# Altium footprint library 2.00-SOP、SOIC封装.PcbLib: 70 footprints (part 1 of 5)
Each footprint in its own frame and in the unit in brackets; x right, y up, seen from the top. Pads: shape width x height; smd on the part's side, far side on the other; paste and mask are expansions set on the pad; w line width, h text height; cw(c..) or ccw(c..) is an arc to the next point about the centre after c.
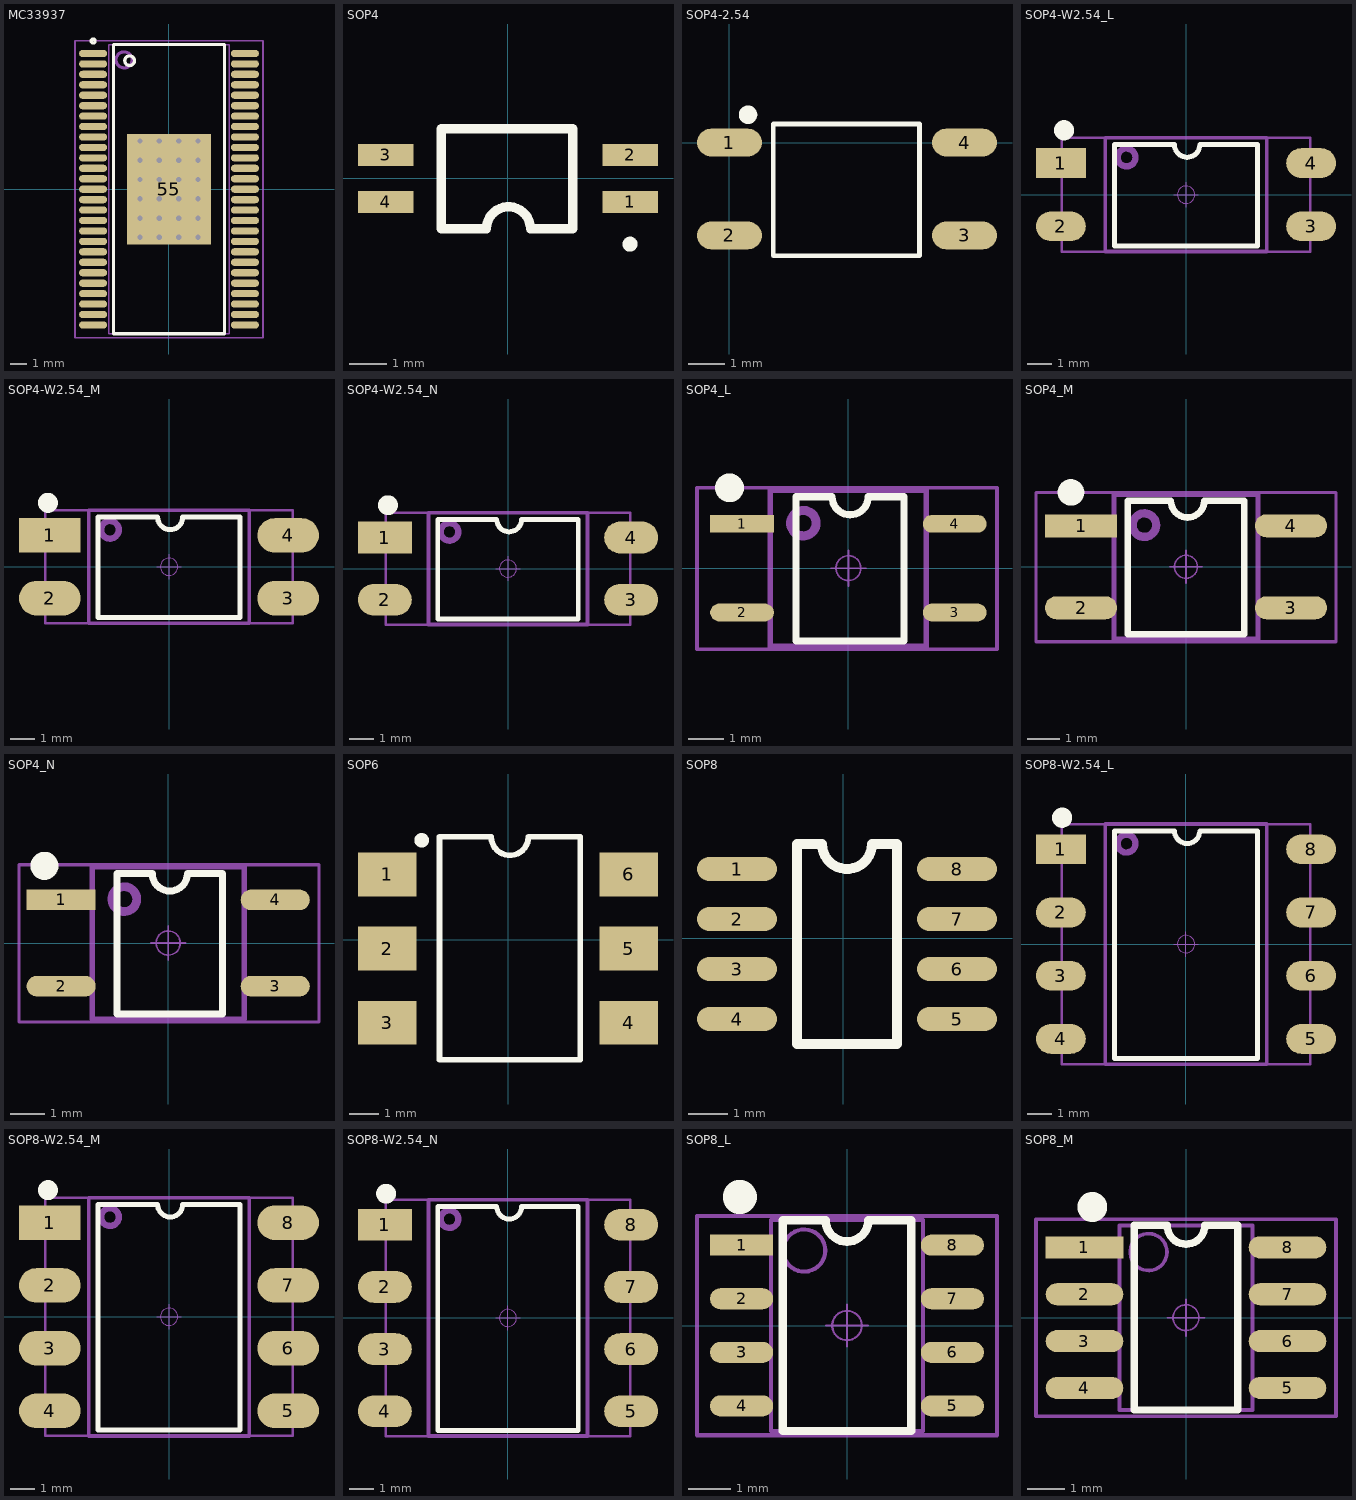
[diagram p0: the footprints below, top view; thin cyan lines are the x and y axes]

## MC33937 [mm] "SOP, 54-Leads, Body 18.0x7.5mm (max), Pitch 0.65mm, IPC Medium Density"
height 2.45
pads (55):
  oval 1.75x0.45 smd: 1(-4.725,8.45) 2(-4.725,7.8) 3(-4.725,7.15) 4(-4.725,6.5) 5(-4.725,5.85) 6(-4.725,5.2) 7(-4.725,4.55) 8(-4.725,3.9) 9(-4.725,3.25) 10(-4.725,2.6) 11(-4.725,1.95) 12(-4.725,1.3) 13(-4.725,0.65) 14(-4.725,0) 15(-4.725,-0.65) 16(-4.725,-1.3) 17(-4.725,-1.95) 18(-4.725,-2.6) 19(-4.725,-3.25) 20(-4.725,-3.9) 21(-4.725,-4.55) 22(-4.725,-5.2) 23(-4.725,-5.85) 24(-4.725,-6.5) 25(-4.725,-7.15) 26(-4.725,-7.8) 27(-4.725,-8.45) 28(4.725,-8.45) 29(4.725,-7.8) 30(4.725,-7.15) 31(4.725,-6.5) 32(4.725,-5.85) 33(4.725,-5.2) 34(4.725,-4.55) 35(4.725,-3.9) 36(4.725,-3.25) 37(4.725,-2.6) 38(4.725,-1.95) 39(4.725,-1.3) 40(4.725,-0.65) 41(4.725,0) 42(4.725,0.65) 43(4.725,1.3) 44(4.725,1.95) 45(4.725,2.6) 46(4.725,3.25) 47(4.725,3.9) 48(4.725,4.55) 49(4.725,5.2) 50(4.725,5.85) 51(4.725,6.5) 52(4.725,7.15) 53(4.725,7.8) 54(4.725,8.45)
  rect 5.2x6.9 smd: 55(0,0)
via 1.8,-3 diameter 0.66 hole 0.33
via 0.6,-3 diameter 0.66 hole 0.33
via -0.6,-3 diameter 0.66 hole 0.33
via -1.8,-3 diameter 0.66 hole 0.33
via 1.8,-1.8 diameter 0.66 hole 0.33
via 0.6,-1.8 diameter 0.66 hole 0.33
via -0.6,-1.8 diameter 0.66 hole 0.33
via -1.8,-1.8 diameter 0.66 hole 0.33
via 1.8,-0.6 diameter 0.66 hole 0.33
via 0.6,-0.6 diameter 0.66 hole 0.33
via -0.6,-0.6 diameter 0.66 hole 0.33
via -1.8,-0.6 diameter 0.66 hole 0.33
via 1.8,0.6 diameter 0.66 hole 0.33
via 0.6,0.6 diameter 0.66 hole 0.33
via -0.6,0.6 diameter 0.66 hole 0.33
via -1.8,0.6 diameter 0.66 hole 0.33
via 1.8,1.8 diameter 0.66 hole 0.33
via 0.6,1.8 diameter 0.66 hole 0.33
via -0.6,1.8 diameter 0.66 hole 0.33
via -1.8,1.8 diameter 0.66 hole 0.33
via 1.8,3 diameter 0.66 hole 0.33
via 0.6,3 diameter 0.66 hole 0.33
via -0.6,3 diameter 0.66 hole 0.33
via -1.8,3 diameter 0.66 hole 0.33
Top Overlay:
  circle w0.2: c-2.45,8 r0.3
  circle w0.2: c-4.725,9.225 r0.125
  lines w0.2: -3.45,-9 3.45,-9 3.45,9 -3.45,9 -3.45,-9
Mechanical 13:
  circle w0.2: c-2.8,8.05 r0.5
  lines w0.1: -3.75,-9 3.75,-9 3.75,9 -3.75,9 -3.75,-9
Mechanical 15:
  lines w0.1: -0.5,0 0.5,0 ; 0,-0.5 0,0.5 ; -5.85,-9.25 5.85,-9.25 5.85,9.25 -5.85,9.25 -5.85,-9.25
3D body: height 2.45, standoff 0.1, extent -3.75,-9 3.75,9

## SOP4 [mm] "间距1.27mm     封装库来自淘宝卖家 ID：黄晶宝石"
pads (4):
  rect 1.5x0.6 smd: 1(3.31,-0.635) 2(3.31,0.635) 3(-3.309,0.635) 4(-3.309,-0.635)
Top Overlay:
  circle w0.203: c3.302,-1.778 r0.102
  lines w0.254: -1.805,-1.361 -1.805,1.346 ; -1.794,-1.361 -0.582,-1.361 cw(c0.013,-1.361) 0.608,-1.361 1.751,-1.361 1.751,1.346 -1.786,1.346
3D body "SOP-4-1.STEP": height 2.1, standoff 0, extent -3.5,-1.4 3.5,1.4

## SOP4-2.54 [mil] "间距2.54mm       封装库来自淘宝卖家 ID：黄晶宝石"
pads (4):
  oval 70x30 smd: 1(0,0) 2(0,-100) 3(253.23,-100) 4(253.23,0)
Top Overlay:
  circle w10: c20,30 r4.92
  lines w5: 47.24,-121.73 204.72,-121.73 204.72,20 47.24,20 47.24,-121.73
3D body "SOP-42.STEP": height 78.74, standoff -3.96, extent -12.79,-120.87 262.8,20.87

## SOP4-W2.54_L [mm] "6.5*4.58*3.5mm（长宽高）   封装库来自淘宝卖家 ID：黄晶宝石"
pads (4):
  rect 2x1.2 smd: 1(-5.029,1.27)
  oval 2x1.2 smd: 2(-5.029,-1.27) 3(5.029,-1.27) 4(5.029,1.27)
Top Overlay:
  circle w0.5: c-4.904,2.591 r0.155
  lines w0.2: -2.87,2.012 -2.87,-2.052 2.87,-2.052 2.87,2.012
  lines w0.203: -2.87,2.012 -0.46,2.012 ccw(c0.048,2.012) 0.048,1.504 ccw(c0.048,2.012) 0.556,2.012 2.87,2.012
Mechanical 13:
  circle w0.254: c-2.391,1.499 r0.359
  lines w0.15: -3.25,-2.286 3.25,-2.286 3.25,2.286 -3.25,2.286 -3.25,-2.286
Mechanical 15:
  circle w0.05: c0,0 r0.35
  lines w0.05: -0.5,0 0.5,0 ; 0,-0.5 0,0.5
  lines w0.1: -5.004,-2.286 5.004,-2.286 5.004,2.286 -5.004,2.286 -5.004,-2.286
3D body "SOP-4 6.5.STEP": height 3.83, standoff -0.02, extent -5,-2.29 5,2.29

## SOP4-W2.54_M [mm] "6.5*4.58*3.5mm（长宽高）  淘宝ID:黄晶宝石"
pads (4):
  rect 2.5x1.4 smd: 1(-4.826,1.27)
  oval 2.5x1.4 smd: 2(-4.826,-1.27) 3(4.826,-1.27) 4(4.826,1.27)
Top Overlay:
  circle w0.5: c-4.904,2.591 r0.155
  lines w0.2: -2.87,2.012 -2.87,-2.052 2.87,-2.052 2.87,2.012
  lines w0.203: -2.87,2.012 -0.46,2.012 ccw(c0.048,2.012) 0.048,1.504 ccw(c0.048,2.012) 0.556,2.012 2.87,2.012
Mechanical 13:
  circle w0.254: c-2.391,1.499 r0.359
  lines w0.15: -3.25,-2.286 3.25,-2.286 3.25,2.286 -3.25,2.286 -3.25,-2.286
Mechanical 15:
  circle w0.05: c0,0 r0.35
  lines w0.05: -0.5,0 0.5,0 ; 0,-0.5 0,0.5
  lines w0.1: -5.004,-2.286 5.004,-2.286 5.004,2.286 -5.004,2.286 -5.004,-2.286
3D body "SOP-4 6.5.STEP": height 3.83, standoff -0.02, extent -5,-2.29 5,2.29

## SOP4-W2.54_N [mm] "6.5*4.58*3.5mm（长宽高）  淘宝ID:黄晶宝石"
pads (4):
  rect 2.2x1.3 smd: 1(-5.029,1.27)
  oval 2.2x1.3 smd: 2(-5.029,-1.27) 3(5.029,-1.27) 4(5.029,1.27)
Top Overlay:
  circle w0.5: c-4.904,2.591 r0.155
  lines w0.2: -2.87,2.012 -2.87,-2.052 2.87,-2.052 2.87,2.012
  lines w0.203: -2.87,2.012 -0.46,2.012 ccw(c0.048,2.012) 0.048,1.504 ccw(c0.048,2.012) 0.556,2.012 2.87,2.012
Mechanical 13:
  circle w0.254: c-2.391,1.499 r0.359
  lines w0.15: -3.25,-2.286 3.25,-2.286 3.25,2.286 -3.25,2.286 -3.25,-2.286
Mechanical 15:
  circle w0.05: c0,0 r0.35
  lines w0.05: -0.5,0 0.5,0 ; 0,-0.5 0,0.5
  lines w0.1: -5.004,-2.286 5.004,-2.286 5.004,2.286 -5.004,2.286 -5.004,-2.286
3D body "SOP-4 6.5.STEP": height 3.83, standoff -0.02, extent -5,-2.29 5,2.29

## SOP4_L [mm] "4.4*6.8*2.1mm（长宽高）封装库来自淘宝卖家 ID：黄晶宝石"
pads (4):
  rect 1.8x0.5 smd: 1(-3,1.25)
  oval 1.8x0.5 smd: 2(-3,-1.25) 3(3,-1.25) 4(3,1.25)
Top Overlay:
  circle w0.5: c-3.353,2.266 r0.155
  lines w0.2: -1.476,2.012 -1.476,-2.052 1.572,-2.052 1.572,2.012
  lines w0.203: -1.476,2.012 -0.46,2.012 ccw(c0.048,2.012) 0.048,1.504 ccw(c0.048,2.012) 0.556,2.012 1.572,2.012
Mechanical 13:
  circle w0.254: c-1.27,1.27 r0.359
  lines w0.15: -2.2,-2.2 -2.2,2.2 2.2,2.2 2.2,-2.2 -2.2,-2.2
Mechanical 15:
  circle w0.05: c0,0 r0.35
  lines w0.05: -0.5,0 0.5,0 ; 0,-0.5 0,0.5
  lines w0.1: -4.27,-2.286 4.191,-2.286 4.191,2.266 -4.27,2.266 -4.27,-2.286
3D body "SOP4.STEP": height 1.9, standoff 0, extent -3.403,-2.15 3.403,2.15

## SOP4_M [mm] "4.4*6.8*2.1mm（长宽高）  淘宝ID:黄晶宝石"
pads (4):
  rect 2.2x0.7 smd: 1(-3.2,1.25)
  oval 2.2x0.7 smd: 2(-3.2,-1.25) 3(3.2,-1.25) 4(3.2,1.25)
Top Overlay:
  circle w0.5: c-3.505,2.266 r0.155
  lines w0.2: -1.778,2.012 -1.778,-2.052 1.778,-2.052 1.778,2.012
  lines w0.203: -1.778,2.012 -0.46,2.012 ccw(c0.048,2.012) 0.048,1.504 ccw(c0.048,2.012) 0.556,2.012 1.778,2.012
Mechanical 13:
  circle w0.254: c-1.27,1.27 r0.359
  lines w0.15: -2.2,-2.2 2.2,-2.2 2.2,2.2 -2.2,2.2 -2.2,-2.2
Mechanical 15:
  circle w0.05: c0,0 r0.35
  lines w0.05: -0.5,0 0.5,0 ; 0,-0.5 0,0.5
  lines w0.1: -4.572,-2.286 4.572,-2.286 4.572,2.266 -4.572,2.266 -4.572,-2.286
3D body "SOP4.STEP": height 1.9, standoff 0, extent -3.403,-2.15 3.403,2.15

## SOP4_N [mm] "4.4*6.8*2.1mm（长宽高）"
pads (4):
  rect 2x0.6 smd: 1(-3.1,1.25)
  oval 2x0.6 smd: 2(-3.1,-1.25) 3(3.1,-1.25) 4(3.1,1.25)
Top Overlay:
  circle w0.5: c-3.581,2.235 r0.155
  lines w0.2: -1.476,2.012 -1.476,-2.052 1.572,-2.052 1.572,2.012
  lines w0.203: -1.476,2.012 -0.46,2.012 ccw(c0.048,2.012) 0.048,1.504 ccw(c0.048,2.012) 0.556,2.012 1.572,2.012
Mechanical 13:
  circle w0.254: c-1.27,1.27 r0.359
  lines w0.15: -2.2,-2.2 2.2,-2.2 2.2,2.2 -2.2,2.2 -2.2,-2.2
Mechanical 15:
  circle w0.05: c0,0 r0.35
  lines w0.05: -0.5,0 0.5,0 ; 0,-0.5 0,0.5
  lines w0.1: -4.318,-2.286 4.366,-2.286 4.366,2.266 -4.318,2.266 -4.318,-2.286
3D body "SOP4.STEP": height 1.9, standoff 0, extent -3.403,-2.15 3.403,2.15

## SOP6 [mm] "封装库来自淘宝卖家 ID：黄晶宝石"
pads (6):
  rect 2x1.5 smd: 1(-4.14,2.235) 2(-4.14,-0.305) 3(-4.14,-2.845) 4(4.14,-2.845) 5(4.14,-0.305) 6(4.14,2.235)
Top Overlay:
  circle w0.25: c-2.957,3.404 r0.125
  lines w0.2: -2.349,-4.115 -2.349,3.524 -0.572,3.524 ccw(c0.064,3.524) 0.699,3.524 2.476,3.524 2.476,-4.115 -2.349,-4.115
3D body "SOP-6.STEP": height 4, standoff -0.08, extent -4.572,-4.636 4.593,3.874

## SOP8 [mil] "封装库来自淘宝卖家 ID：黄晶宝石"
pads (8):
  oval 80x24 smd: 1(-106,69) 2(-106,19) 3(-106,-31) 4(-106,-81) 5(114,-81) 6(114,-31) 7(114,19) 8(114,69)
Top Overlay:
  lines w10: -46,-106 54,-106 54,94 29,94 cw(c4,94) -21,94 -46,94 -46,-106
3D body "SOP8.STEP": height 62.99, standoff 0, extent -108.93,-103.82 128.94,93.82

## SOP8-W2.54_L [mm] "6.5*9.66*3.5mm（长宽高）  淘宝ID:黄晶宝石"
pads (8):
  rect 2x1.2 smd: 1(-5.029,3.81)
  oval 2x1.2 smd: 2(-5.029,1.27) 3(-5.029,-1.27) 4(-5.029,-3.81) 5(5.029,-3.81) 6(5.029,-1.27) 7(5.029,1.27) 8(5.029,3.81)
Top Overlay:
  circle w0.5: c-4.98,5.08 r0.155
  lines w0.2: -2.87,4.552 -2.87,-4.592 2.87,-4.592 2.87,4.552
  lines w0.203: -2.87,4.552 -0.46,4.552 ccw(c0.048,4.552) 0.048,4.044 ccw(c0.048,4.552) 0.556,4.552 2.87,4.552
Mechanical 13:
  circle w0.254: c-2.391,4.039 r0.359
  lines w0.15: -3.25,-4.826 -3.25,4.826 3.25,4.826 3.25,-4.826 -3.25,-4.826
Mechanical 15:
  circle w0.05: c0,0 r0.35
  lines w0.05: -0.5,0 0.5,0 ; 0,-0.5 0,0.5
  lines w0.1: -5.004,-4.826 -5.004,4.826 5.004,4.826 5.004,-4.826 -5.004,-4.826
3D body "SOP8-W2.54.STEP": height 3.82, standoff -0.03, extent -5,-4.83 5,4.83

## SOP8-W2.54_M [mm] "6.5*9.66*3.5mm（长宽高）  淘宝ID:黄晶宝石"
pads (8):
  rect 2.5x1.4 smd: 1(-4.826,3.81)
  oval 2.5x1.4 smd: 2(-4.826,1.27) 3(-4.826,-1.27) 4(-4.826,-3.81) 5(4.826,-3.81) 6(4.826,-1.27) 7(4.826,1.27) 8(4.826,3.81)
Top Overlay:
  circle w0.5: c-4.904,5.131 r0.155
  lines w0.2: -2.87,4.552 -2.87,-4.592 2.87,-4.592 2.87,4.552
  lines w0.203: -2.87,4.552 -0.46,4.552 ccw(c0.048,4.552) 0.048,4.044 ccw(c0.048,4.552) 0.556,4.552 2.87,4.552
Mechanical 13:
  circle w0.254: c-2.391,4.039 r0.359
  lines w0.15: -3.25,-4.826 3.25,-4.826 3.25,4.826 -3.25,4.826 -3.25,-4.826
Mechanical 15:
  circle w0.05: c0,0 r0.35
  lines w0.05: -0.5,0 0.5,0 ; 0,-0.5 0,0.5
  lines w0.1: -5.004,-4.826 5.004,-4.826 5.004,4.826 -5.004,4.826 -5.004,-4.826
3D body "SOP8-W2.54.STEP": height 3.82, standoff -0.03, extent -5,-4.83 5,4.83

## SOP8-W2.54_N [mm] "6.5*9.66*3.5mm（长宽高）  淘宝ID:黄晶宝石"
pads (8):
  rect 2.2x1.3 smd: 1(-5.029,3.81)
  oval 2.2x1.3 smd: 2(-5.029,1.27) 3(-5.029,-1.27) 4(-5.029,-3.81) 5(5.029,-3.81) 6(5.029,-1.27) 7(5.029,1.27) 8(5.029,3.81)
Top Overlay:
  circle w0.5: c-4.98,5.08 r0.155
  lines w0.2: -2.87,4.552 -2.87,-4.592 2.87,-4.592 2.87,4.552
  lines w0.203: -2.87,4.552 -0.46,4.552 ccw(c0.048,4.552) 0.048,4.044 ccw(c0.048,4.552) 0.556,4.552 2.87,4.552
Mechanical 13:
  circle w0.254: c-2.391,4.039 r0.359
  lines w0.15: -3.25,-4.826 3.25,-4.826 3.25,4.826 -3.25,4.826 -3.25,-4.826
Mechanical 15:
  circle w0.05: c0,0 r0.35
  lines w0.05: -0.5,0 0.5,0 ; 0,-0.5 0,0.5
  lines w0.1: -5.004,-4.826 5.004,-4.826 5.004,4.826 -5.004,4.826 -5.004,-4.826
3D body "SOP8-W2.54.STEP": height 3.82, standoff -0.03, extent -5,-4.83 5,4.83

## SOP8_L [mm] "5*6*1.8mm（长宽高）封装库来自淘宝卖家 ID：黄晶宝石"
height 1.75
pads (8):
  rect 1.5x0.5 smd: 1(-2.5,1.905)
  oval 1.5x0.5 smd: 2(-2.5,0.635) 3(-2.5,-0.635) 4(-2.5,-1.905) 5(2.5,-1.905) 6(2.5,-0.635) 7(2.5,0.635) 8(2.5,1.905)
Top Overlay:
  circle w0.5: c-2.54,3.048 r0.155
  lines w0.2: -1.524,2.5 -1.524,-2.5 1.524,-2.5 1.524,2.5
  lines w0.203: -1.524,2.5 -0.508,2.5 ccw(c0,2.5) 0,1.992 ccw(c0,2.5) 0.508,2.5 1.524,2.5
Mechanical 13:
  circle w0.1: c-1.016,1.778 r0.5
  lines w0.1: -1.8,-2.5 1.8,-2.5 1.8,2.5 -1.8,2.5 -1.8,-2.5
Mechanical 15:
  circle w0.05: c0,0 r0.35
  lines w0.05: -0.5,0 0.5,0 ; 0,-0.5 0,0.5
  lines w0.1: -3.556,-2.6 3.556,-2.6 3.556,2.6 -3.556,2.6 -3.556,-2.6
3D body "SOP8.STEP": height 1.9, standoff 0, extent -3.003,-2.5 3.003,2.5

## SOP8_M [mm] "5*6*1.8mm（长宽高）封装库来自淘宝卖家 ID：黄晶宝石"
height 1.75
pads (8):
  rect 2.1x0.6 smd: 1(-2.75,1.905)
  oval 2.1x0.6 smd: 2(-2.75,0.635) 3(-2.75,-0.635) 4(-2.75,-1.905) 5(2.75,-1.905) 6(2.75,-0.635) 7(2.75,0.635) 8(2.75,1.905)
Top Overlay:
  circle w0.5: c-2.54,3 r0.155
  lines w0.2: -1.397,2.5 -1.397,-2.5 1.397,-2.5 1.397,2.5
  lines w0.203: -1.397,2.5 -0.508,2.5 ccw(c0,2.5) 0,1.992 ccw(c0,2.5) 0.508,2.5 1.397,2.5
Mechanical 13:
  circle w0.1: c-1.016,1.778 r0.5
  lines w0.1: -1.8,-2.5 -1.8,2.5 1.8,2.5 1.8,-2.5 -1.8,-2.5
Mechanical 15:
  circle w0.05: c0,0 r0.35
  lines w0.05: -0.5,0 0.5,0 ; 0,-0.5 0,0.5
  lines w0.1: -4.064,-2.667 -4.064,2.667 4.064,2.667 4.064,-2.667 -4.064,-2.667
3D body "SOP8.STEP": height 1.9, standoff 0, extent -3.003,-2.5 3.003,2.5